# Altium footprint library Footprint-Lib-PhilsLab.PcbLib: 544 footprints (part 7 of 34)
Each footprint in its own frame and in the unit in brackets; x right, y up, seen from the top. Pads: shape width x height; smd on the part's side, far side on the other; paste and mask are expansions set on the pad; w line width, h text height; cw(c..) or ccw(c..) is an arc to the next point about the centre after c.
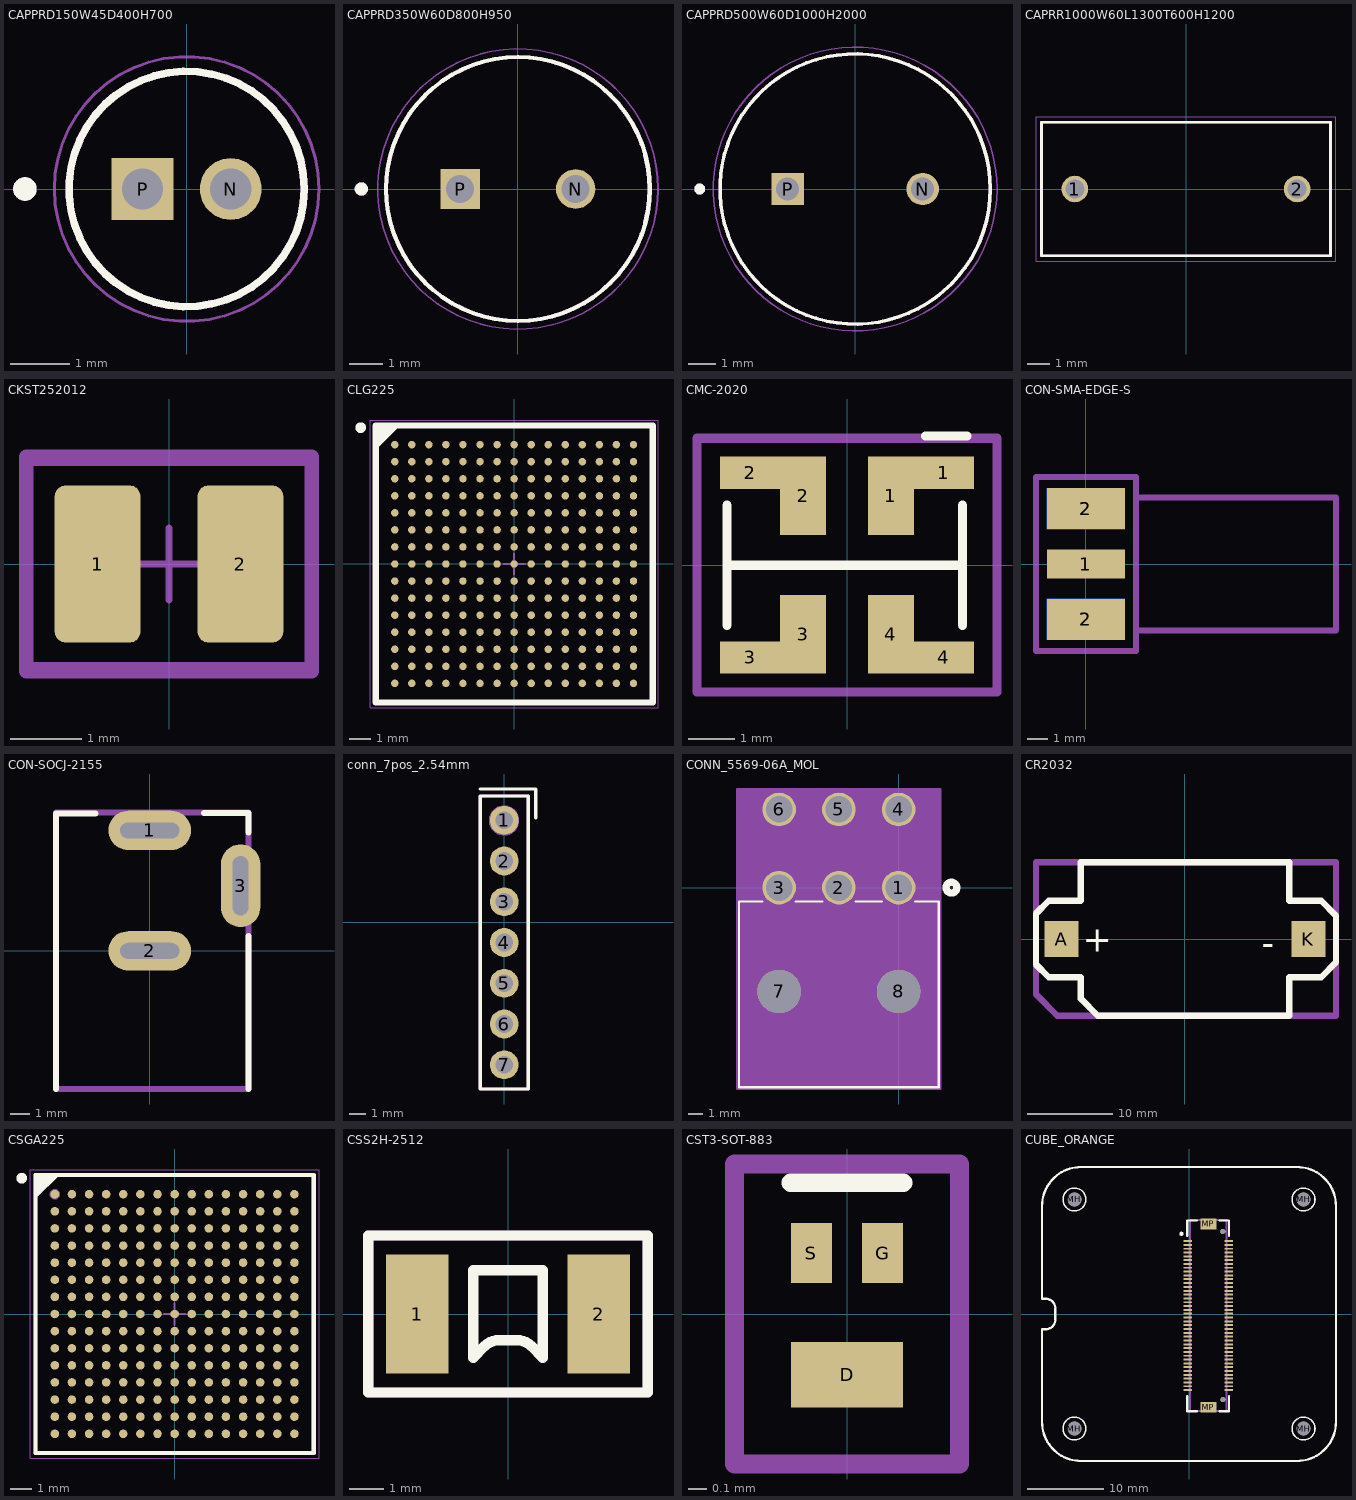
[diagram p6: the footprints below, top view; thin cyan lines are the x and y axes]

## CAPPRD150W45D400H700 [mm]
pads (2):
  round 1.05 hole 0.7: N(0.75,0)
  rect 1.05x1.05 / inner round 1.05 / far side rect 1.05x1.05 hole 0.7: P(-0.75,0)
Top Overlay:
  circle w0.127: c0,0 r2
  circle w0.2: c-2.75,0 r0.1
Mechanical 13:
  circle w0.127: c0,0 r2
  circle w0.2: c-2.75,0 r0.1
Mechanical 15:
  circle w0.05: c0,0 r2.25
3D body "step_temp.STEP": height 7, standoff -17, extent -2,-1.999 2,1.999

## CAPPRD350W60D800H950 [mm]
pads (2):
  round 1.2 hole 0.85: N(1.75,0)
  rect 1.2x1.2 hole 0.85: P(-1.75,0)
Top Overlay:
  circle w0.127: c0,0 r4
  circle w0.2: c-4.75,0 r0.1
Mechanical 13:
  circle w0.127: c0,0 r4
  circle w0.2: c-4.75,0 r0.1
Mechanical 15:
  circle w0.05: c0,0 r4.25
3D body "step_temp.STEP": height 9.5, standoff -17, extent -4,-4 4,4

## CAPPRD500W60D1000H2000 [mm]
pads (2):
  round 1.2 hole 0.85: N(2.5,0)
  rect 1.2x1.2 hole 0.85: P(-2.5,0)
Top Overlay:
  circle w0.127: c0,0 r5
  circle w0.2: c-5.75,0 r0.1
Mechanical 13:
  circle w0.127: c0,0 r5
  circle w0.2: c-5.75,0 r0.1
Mechanical 15:
  circle w0.05: c0,0 r5.25
3D body "step_temp.STEP": height 20, standoff -17, extent -5,-5 5,5

## CAPRR1000W60L1300T600H1200 [mm]
pads (2):
  round 1.2 hole 0.85: 1(-5,0) 2(5,0)
Top Overlay:
  lines w0.127: -6.5,-3 -6.5,3 6.5,3 6.5,-3 -6.5,-3
Mechanical 13:
  lines w0.127: -6.5,-3 6.5,-3 6.5,3 -6.5,3 -6.5,-3
Mechanical 15:
  lines w0.05: -6.75,-3.25 6.75,-3.25 6.75,3.25 -6.75,3.25 -6.75,-3.25
3D body "Film Capacitor 13x6x12mm.step": height 12.01, standoff -2.49, extent -6.5,-3 6.5,3

## CKST252012 [mm]
height 1.2
pads (2):
  rrect25% 1.2x2.2 smd: 1(-1,0) 2(1,0)
Mechanical 13:
  lines w0.2: -2,-1.5 -2,1.5 2,1.5 2,-1.5 -2,-1.5
  text "'.Designator'" at -5.665,-0.417 h1
Mechanical 15:
  lines w0.05: -1.95,-1.4 -1.95,1.4 1.95,1.4 1.95,-1.4 -1.95,-1.4
  lines w0.1: -0.5,0 0.5,0 ; 0,-0.5 0,0.5
3D body "CKST252012.step": height 1.2, standoff 0, extent -1.35,-1.1 1.35,1.1

## CLG225 [mm] "BGA, 225-Leads, Body 13.00x13.00mmx1.50mm, Pitch 0.80mm"
height 1.5
pads (225):
  round 0.35 smd mask+0.03: A1(-5.6,5.6) A2(-4.8,5.6) A3(-4,5.6) A4(-3.2,5.6) A5(-2.4,5.6) A6(-1.6,5.6) A7(-0.8,5.6) A8(0,5.6) A9(0.8,5.6) A10(1.6,5.6) A11(2.4,5.6) A12(3.2,5.6) A13(4,5.6) A14(4.8,5.6) A15(5.6,5.6) B1(-5.6,4.8) B2(-4.8,4.8) B3(-4,4.8) B4(-3.2,4.8) B5(-2.4,4.8) B6(-1.6,4.8) B7(-0.8,4.8) B8(0,4.8) B9(0.8,4.8) B10(1.6,4.8) B11(2.4,4.8) B12(3.2,4.8) B13(4,4.8) B14(4.8,4.8) B15(5.6,4.8) C1(-5.6,4) C2(-4.8,4) C3(-4,4) C4(-3.2,4) C5(-2.4,4) C6(-1.6,4) C7(-0.8,4) C8(0,4) C9(0.8,4) C10(1.6,4) C11(2.4,4) C12(3.2,4) C13(4,4) C14(4.8,4) C15(5.6,4) D1(-5.6,3.2) D2(-4.8,3.2) D3(-4,3.2) D4(-3.2,3.2) D5(-2.4,3.2) D6(-1.6,3.2) D7(-0.8,3.2) D8(0,3.2) D9(0.8,3.2) D10(1.6,3.2) D11(2.4,3.2) D12(3.2,3.2) D13(4,3.2) D14(4.8,3.2) D15(5.6,3.2) E1(-5.6,2.4) E2(-4.8,2.4) E3(-4,2.4) E4(-3.2,2.4) E5(-2.4,2.4) E6(-1.6,2.4) E7(-0.8,2.4) E8(0,2.4) E9(0.8,2.4) E10(1.6,2.4) E11(2.4,2.4) E12(3.2,2.4) E13(4,2.4) E14(4.8,2.4) E15(5.6,2.4) F1(-5.6,1.6) F2(-4.8,1.6) F3(-4,1.6) F4(-3.2,1.6) F5(-2.4,1.6) F6(-1.6,1.6) F7(-0.8,1.6) F8(0,1.6) F9(0.8,1.6) F10(1.6,1.6) F11(2.4,1.6) F12(3.2,1.6) F13(4,1.6) F14(4.8,1.6) F15(5.6,1.6) G1(-5.6,0.8) G2(-4.8,0.8) G3(-4,0.8) G4(-3.2,0.8) G5(-2.4,0.8) G6(-1.6,0.8) G7(-0.8,0.8) G8(0,0.8) G9(0.8,0.8) G10(1.6,0.8) G11(2.4,0.8) G12(3.2,0.8) G13(4,0.8) G14(4.8,0.8) G15(5.6,0.8) H1(-5.6,0) H2(-4.8,0) H3(-4,0) H4(-3.2,0) H5(-2.4,0) H6(-1.6,0) H7(-0.8,0) H8(0,0) H9(0.8,0) H10(1.6,0) H11(2.4,0) H12(3.2,0) H13(4,0) H14(4.8,0) H15(5.6,0) J1(-5.6,-0.8) J2(-4.8,-0.8) J3(-4,-0.8) J4(-3.2,-0.8) J5(-2.4,-0.8) J6(-1.6,-0.8) J7(-0.8,-0.8) J8(0,-0.8) J9(0.8,-0.8) J10(1.6,-0.8) J11(2.4,-0.8) J12(3.2,-0.8) J13(4,-0.8) J14(4.8,-0.8) J15(5.6,-0.8) K1(-5.6,-1.6) K2(-4.8,-1.6) K3(-4,-1.6) K4(-3.2,-1.6) K5(-2.4,-1.6) K6(-1.6,-1.6) K7(-0.8,-1.6) K8(0,-1.6) K9(0.8,-1.6) K10(1.6,-1.6) K11(2.4,-1.6) K12(3.2,-1.6) K13(4,-1.6) K14(4.8,-1.6) K15(5.6,-1.6) L1(-5.6,-2.4) L2(-4.8,-2.4) L3(-4,-2.4) L4(-3.2,-2.4) L5(-2.4,-2.4) L6(-1.6,-2.4) L7(-0.8,-2.4) L8(0,-2.4) L9(0.8,-2.4) L10(1.6,-2.4) L11(2.4,-2.4) L12(3.2,-2.4) L13(4,-2.4) L14(4.8,-2.4) L15(5.6,-2.4) M1(-5.6,-3.2) M2(-4.8,-3.2) M3(-4,-3.2) M4(-3.2,-3.2) M5(-2.4,-3.2) M6(-1.6,-3.2) M7(-0.8,-3.2) M8(0,-3.2) M9(0.8,-3.2) M10(1.6,-3.2) M11(2.4,-3.2) M12(3.2,-3.2) M13(4,-3.2) M14(4.8,-3.2) M15(5.6,-3.2) N1(-5.6,-4) N2(-4.8,-4) N3(-4,-4) N4(-3.2,-4) N5(-2.4,-4) N6(-1.6,-4) N7(-0.8,-4) N8(0,-4) N9(0.8,-4) N10(1.6,-4) N11(2.4,-4) N12(3.2,-4) N13(4,-4) N14(4.8,-4) N15(5.6,-4) P1(-5.6,-4.8) P2(-4.8,-4.8) P3(-4,-4.8) P4(-3.2,-4.8) P5(-2.4,-4.8) P6(-1.6,-4.8) P7(-0.8,-4.8) P8(0,-4.8) P9(0.8,-4.8) P10(1.6,-4.8) P11(2.4,-4.8) P12(3.2,-4.8) P13(4,-4.8) P14(4.8,-4.8) P15(5.6,-4.8) R1(-5.6,-5.6) R2(-4.8,-5.6) R3(-4,-5.6) R4(-3.2,-5.6) R5(-2.4,-5.6) R6(-1.6,-5.6) R7(-0.8,-5.6) R8(0,-5.6) R9(0.8,-5.6) R10(1.6,-5.6) R11(2.4,-5.6) R12(3.2,-5.6) R13(4,-5.6) R14(4.8,-5.6) R15(5.6,-5.6)
Top Overlay:
  circle w0.25: c-7.2,6.4 r0.125
  region: -5.549,6.5 -6.5,5.549 -6.5,6.5
  lines w0.3: -6.5,5.549 -5.549,6.5 ; -6.5,-6.5 -6.5,6.5 6.5,6.5 6.5,-6.5 -6.5,-6.5
Mechanical 13:
  lines w0.1: -6.5,-6.5 -6.5,6.5 6.5,6.5 6.5,-6.5 -6.5,-6.5
Mechanical 15:
  lines w0.05: -6.75,-6.75 -6.75,6.75 6.75,6.75 6.75,-6.75 -6.75,-6.75
  lines w0.1: -0.5,0 0.5,0 ; 0,-0.5 0,0.5
3D body "CLG225.step": height 1.5, standoff 0, extent -6.5,-6.5 6.5,6.5

## CMC-2020 [mm]
height 2.5
pads (8):
  rect 1x1.7 smd: 1(0.95,1.5) 2(-0.95,1.5) 3(-0.95,-1.5) 4(0.95,-1.5)
  rect 1.3x0.7 smd: 1(2.1,2) 2(-2.1,2) 3(-2.1,-2) 4(2.1,-2)
Top Overlay:
  lines w0.2: -2.6,-1.3 -2.6,1.3 ; -2.6,0 2.5,0 ; 1.7,2.8 2.6,2.8 ; 2.5,-1.3 2.5,1.3
Mechanical 13:
  circle w0.35: c2.25,2 r0.15
  lines w0.2: -3.25,-2.75 3.25,-2.75 3.25,2.75 -3.25,2.75 -3.25,-2.75
  text "'.Designator'" at -5.665,-0.417 h1
3D body "DLW5BTM251SQ2L.STEP": height 2.51, standoff 0.01, extent -2.5,-2.5 2.5,2.5

## CON-SMA-EDGE-S [mm]
pads (5):
  rect 3.8x1.4 smd mask+0.07: 1(0,0)
  rect 3.8x2 smd mask+0.07: 2(0,-2.7) 2(0,2.7)
  rect 3.8x2 smd far side mask+0.07: 2(0,-2.7) 2(0,2.7)
Mechanical 13:
  lines w0.3: 2.45,-3.25 12.2,-3.25 12.2,3.25 2.45,3.25 ; -2.433,-4.25 2.45,-4.25 2.45,-4 2.45,4.25 -2.433,4.25 -2.433,-4.25
  text "'.Designator'" at -5.84,-0.925 h1
3D body "CON-SMA-EDGE-S.step": height 3.64, standoff -2.71, extent -1.16,-3.175 12.17,3.175

## CON-SOCJ-2155 [mm]
pads (3):
  oval 4.2x2 hole 0.8 slot 3 at 0 deg: 1(0,6.1) 2(0,0)
  oval 2x4.2 hole 0.8 slot 3 at 90 deg: 3(4.6,3.3)
Top Overlay:
  lines w0.3: -4.75,-7 -4.75,6.95 -2.75,6.95 ; 2.75,6.976 5,6.976 5,6 ; 5,-7 5,0.75
Mechanical 13:
  lines w0.3: -4.75,-7 5,-7 5,7 -4.75,7 -4.75,-7
  text "'.Designator'" at -5.665,-0.417 h1
3D body "CON-SOCJ-2155.STEP": height 11.11, standoff -4.29, extent -4.5,-7.5 4.75,6.6

## conn_7pos_2.54mm [mm]
pads (7):
  round 1.8 hole 1.1 mask+0.07: 1(0,6.35) 2(0,3.81) 3(0,1.27) 4(0,-1.27) 5(0,-3.81) 6(0,-6.35) 7(0,-8.89)
Top Overlay:
  lines w0.2: -1.5,8.3 1.972,8.3 1.972,6.5 ; -1.5,-10.4 -1.5,7.863 1.5,7.863 1.5,-10.4 -1.5,-10.4
Mechanical 13:
  circle w0.25: c-0.012,6.336 r0.823
  lines w0.2: -1.5,-10.4 -1.5,7.864 1.5,7.864 1.5,-10.4 -1.5,-10.4
  text "'.Designator'" at -5.84,-0.925 h1

## CONN_5569-06A_MOL [mil]
pads (8):
  round 93 hole 73 paste-99999 mask+0: 1(0,0) 2(-165.35,0) 3(-330.71,0) 4(0,216.54) 5(-165.35,216.54) 6(-330.71,216.54)
  round 120 hole 120 unplated paste-99999 mask+0: 7(-330.71,-287.4) 8(0,-287.4)
Top Overlay:
  circle w20: c146.15,0 r15
  lines w6: -376.37,-38.31 -441.85,-38.31 -441.85,-552.31 111.15,-552.31 111.15,-38.31 45.66,-38.31 ; -285.05,-38.31 -211.01,-38.31 ; -119.7,-38.31 -45.66,-38.31
  text ".Designator" at -302.85,83.27 h50
Bottom Overlay:
  circle w20: c146.15,0 r15
Mechanical 13:
  circle w20: c0,0 r15
  lines w1: -436.85,-547.31 -436.85,-43.31 106.15,-43.31 106.15,-547.31 -436.85,-547.31
  text ".Designator" at -302.85,83.27 h50
Mechanical 15:
  region: 116.15,273.04 -446.85,273.04 -446.85,-557.31 116.15,-557.31
  lines w6: -446.85,-557.31 116.15,-557.31 116.15,273.04 -446.85,273.04 -446.85,-557.31
3D body "39-30-1060--3DModel-STEP-269445.STEP": height 448.82, standoff -141.73, extent -442.91,-543.7 116.03,241.14

## CR2032 [mm]
pads (2):
  rect 4x4.2 smd: A(-14.5,0) K(14.5,0)
Top Overlay:
  lines w0.75: -17.5,-3 -17.5,3 -16,4.5 -12.25,4.5 -12.25,9 12.25,9 12.25,4.5 16,4.5 17.75,2.75 17.75,-2.75 16,-4.5 12.25,-4.5 12.25,-9 -10.25,-9 -12.25,-7 -12.25,-4.5 -16,-4.5 -17.5,-3
  text "-" at 9,-1.9 h3
  text "+" at -12,-1.5 h3
Mechanical 13:
  lines w0.75: -17.5,-0.75 -17.5,9 17.75,9 17.75,-9 -15,-9 -17.5,-6.5 -17.5,3.25
  text "'.Designator'" at -11.88,-1.8 h2
  text "+" at -15.8,-1.4 h3
  text "-" at 13.2,-1.9 h3
3D body "CR2032_Holder.STEP": height 5.61, standoff 0.01, extent -16.1,-8 16.1,8

## CSGA225 [mm] "BGA, 225-Leads, Body 13.00x13.00mmx1.40mm, Pitch 0.80mm"
height 1.4
pads (225):
  round 0.4 smd: A1(-5.6,5.6) A2(-4.8,5.6) A3(-4,5.6) A4(-3.2,5.6) A5(-2.4,5.6) A6(-1.6,5.6) A7(-0.8,5.6) A8(0,5.6) A9(0.8,5.6) A10(1.6,5.6) A11(2.4,5.6) A12(3.2,5.6) A13(4,5.6) A14(4.8,5.6) A15(5.6,5.6) B1(-5.6,4.8) B2(-4.8,4.8) B3(-4,4.8) B4(-3.2,4.8) B5(-2.4,4.8) B6(-1.6,4.8) B7(-0.8,4.8) B8(0,4.8) B9(0.8,4.8) B10(1.6,4.8) B11(2.4,4.8) B12(3.2,4.8) B13(4,4.8) B14(4.8,4.8) B15(5.6,4.8) C1(-5.6,4) C2(-4.8,4) C3(-4,4) C4(-3.2,4) C5(-2.4,4) C6(-1.6,4) C7(-0.8,4) C8(0,4) C9(0.8,4) C10(1.6,4) C11(2.4,4) C12(3.2,4) C13(4,4) C14(4.8,4) C15(5.6,4) D1(-5.6,3.2) D2(-4.8,3.2) D3(-4,3.2) D4(-3.2,3.2) D5(-2.4,3.2) D6(-1.6,3.2) D7(-0.8,3.2) D8(0,3.2) D9(0.8,3.2) D10(1.6,3.2) D11(2.4,3.2) D12(3.2,3.2) D13(4,3.2) D14(4.8,3.2) D15(5.6,3.2) E1(-5.6,2.4) E2(-4.8,2.4) E3(-4,2.4) E4(-3.2,2.4) E5(-2.4,2.4) E6(-1.6,2.4) E7(-0.8,2.4) E8(0,2.4) E9(0.8,2.4) E10(1.6,2.4) E11(2.4,2.4) E12(3.2,2.4) E13(4,2.4) E14(4.8,2.4) E15(5.6,2.4) F1(-5.6,1.6) F2(-4.8,1.6) F3(-4,1.6) F4(-3.2,1.6) F5(-2.4,1.6) F6(-1.6,1.6) F7(-0.8,1.6) F8(0,1.6) F9(0.8,1.6) F10(1.6,1.6) F11(2.4,1.6) F12(3.2,1.6) F13(4,1.6) F14(4.8,1.6) F15(5.6,1.6) G1(-5.6,0.8) G2(-4.8,0.8) G3(-4,0.8) G4(-3.2,0.8) G5(-2.4,0.8) G6(-1.6,0.8) G7(-0.8,0.8) G8(0,0.8) G9(0.8,0.8) G10(1.6,0.8) G11(2.4,0.8) G12(3.2,0.8) G13(4,0.8) G14(4.8,0.8) G15(5.6,0.8) H1(-5.6,0) H2(-4.8,0) H3(-4,0) H4(-3.2,0) H5(-2.4,0) H6(-1.6,0) H7(-0.8,0) H8(0,0) H9(0.8,0) H10(1.6,0) H11(2.4,0) H12(3.2,0) H13(4,0) H14(4.8,0) H15(5.6,0) J1(-5.6,-0.8) J2(-4.8,-0.8) J3(-4,-0.8) J4(-3.2,-0.8) J5(-2.4,-0.8) J6(-1.6,-0.8) J7(-0.8,-0.8) J8(0,-0.8) J9(0.8,-0.8) J10(1.6,-0.8) J11(2.4,-0.8) J12(3.2,-0.8) J13(4,-0.8) J14(4.8,-0.8) J15(5.6,-0.8) K1(-5.6,-1.6) K2(-4.8,-1.6) K3(-4,-1.6) K4(-3.2,-1.6) K5(-2.4,-1.6) K6(-1.6,-1.6) K7(-0.8,-1.6) K8(0,-1.6) K9(0.8,-1.6) K10(1.6,-1.6) K11(2.4,-1.6) K12(3.2,-1.6) K13(4,-1.6) K14(4.8,-1.6) K15(5.6,-1.6) L1(-5.6,-2.4) L2(-4.8,-2.4) L3(-4,-2.4) L4(-3.2,-2.4) L5(-2.4,-2.4) L6(-1.6,-2.4) L7(-0.8,-2.4) L8(0,-2.4) L9(0.8,-2.4) L10(1.6,-2.4) L11(2.4,-2.4) L12(3.2,-2.4) L13(4,-2.4) L14(4.8,-2.4) L15(5.6,-2.4) M1(-5.6,-3.2) M2(-4.8,-3.2) M3(-4,-3.2) M4(-3.2,-3.2) M5(-2.4,-3.2) M6(-1.6,-3.2) M7(-0.8,-3.2) M8(0,-3.2) M9(0.8,-3.2) M10(1.6,-3.2) M11(2.4,-3.2) M12(3.2,-3.2) M13(4,-3.2) M14(4.8,-3.2) M15(5.6,-3.2) N1(-5.6,-4) N2(-4.8,-4) N3(-4,-4) N4(-3.2,-4) N5(-2.4,-4) N6(-1.6,-4) N7(-0.8,-4) N8(0,-4) N9(0.8,-4) N10(1.6,-4) N11(2.4,-4) N12(3.2,-4) N13(4,-4) N14(4.8,-4) N15(5.6,-4) P1(-5.6,-4.8) P2(-4.8,-4.8) P3(-4,-4.8) P4(-3.2,-4.8) P5(-2.4,-4.8) P6(-1.6,-4.8) P7(-0.8,-4.8) P8(0,-4.8) P9(0.8,-4.8) P10(1.6,-4.8) P11(2.4,-4.8) P12(3.2,-4.8) P13(4,-4.8) P14(4.8,-4.8) P15(5.6,-4.8) R1(-5.6,-5.6) R2(-4.8,-5.6) R3(-4,-5.6) R4(-3.2,-5.6) R5(-2.4,-5.6) R6(-1.6,-5.6) R7(-0.8,-5.6) R8(0,-5.6) R9(0.8,-5.6) R10(1.6,-5.6) R11(2.4,-5.6) R12(3.2,-5.6) R13(4,-5.6) R14(4.8,-5.6) R15(5.6,-5.6)
Top Overlay:
  circle w0.25: c-7.15,6.35 r0.125
  region: -5.513,6.5 -6.5,5.513 -6.5,6.5
  lines w0.2: -6.5,5.513 -5.513,6.5 ; -6.5,-6.5 -6.5,6.5 6.5,6.5 6.5,-6.5 -6.5,-6.5
Mechanical 13:
  circle w0.254: c-5.603,5.597 r0.117
  lines w0.2: -6.5,-6.5 -6.5,6.5 6.5,6.5 6.5,-6.5 -6.5,-6.5
  text ".Designator" at -4.998,-0.333 h1
Mechanical 15:
  lines w0.05: -6.75,-6.75 -6.75,6.75 6.75,6.75 6.75,-6.75 -6.75,-6.75
  lines w0.1: -0.5,0 0.5,0 ; 0,-0.5 0,0.5
3D body "CSGA225.step": height 1.4, standoff 0, extent -6.5,-6.5 6.5,6.5

## CSS2H-2512 [mm]
pads (2):
  rect 1.8x3.4 smd: 1(-2.6,0) 2(2.6,0)
Top Overlay:
  lines w0.3: -4,-2.25 -4,2.25 4,2.25 4,-2.25 -4,-2.25 ; -1,-1.25 -1,1.25 1,1.25 1,-1.25 0.677,-0.927 ccw(c0.25,-1.354) 0.25,-0.75 -0.25,-0.75 ccw(c-0.25,-1.354) -0.677,-0.927 -1,-1.25
Mechanical 13:
  lines w0.3: -4,-2.25 -4,2.25 4,2.25 4,-2.25 -3.75,-2.25 -4,-2.25
  text "'.Designator'" at -7.231,-1.087 h1.25
3D body "CSS2H-2512.step": height 0.84, standoff 0.01, extent -3.175,-1.525 3.175,1.525

## CST3-SOT-883 [mm]
pads (3):
  rect 0.6x0.35 smd: D(0,-0.325)
  rect 0.22x0.32 smd: G(0.19,0.325) S(-0.19,0.325)
Top Overlay:
  lines w0.1: -0.3,0.7 0.3,0.7
Mechanical 13:
  lines w0.1: -0.6,-0.8 -0.6,0.8 0.6,0.8 0.6,-0.8 -0.6,-0.8
  text "'.Designator'" at -5.665,-0.417 h1
3D body "CST3.STEP": height 0.39, standoff 0.01, extent -0.3,-0.5 0.3,0.5

## CUBE_ORANGE [mil]
pads (88):
  rect 44x10 smd mask+7.87: 1(-5.5,375.5) 2(203.83,375.5) 3(-5.5,356.5) 4(203.83,356.5) 5(-5.5,336.5) 6(203.83,336.5) 7(-5.5,316.5) 8(203.83,316.5) 9(-5.5,297.5) 10(203.83,297.5) 11(-5.5,277.5) 12(203.83,277.5) 13(-5.5,257.5) 14(203.83,257.5) 15(-5.5,238.5) 16(203.83,238.5) 17(-5.5,218.5) 18(203.83,218.5) 19(-5.5,198.5) 20(203.83,198.5) 21(-5.5,179.5) 22(203.83,179.5) 23(-5.5,159.5) 24(203.83,159.5) 25(-5.5,139.5) 26(203.83,139.5) 27(-5.5,119.5) 28(203.83,119.5) 29(-5.5,100.5) 30(203.83,100.5) 31(-5.5,80.5) 32(203.83,80.5) 33(-5.5,60.5) 34(203.83,60.5) 35(-5.5,41.5) 36(203.83,41.5) 37(-5.5,21.5) 38(203.83,21.5) 39(-5.5,1.5) 40(203.83,1.5) 41(-5.5,-18.34) 42(203.83,-18.34) 43(-5.5,-38.03) 44(203.83,-38.03) 45(-5.5,-57.71) 46(203.83,-57.71) 47(-5.5,-77.4) 48(203.83,-77.4) 49(-5.5,-97.08) 50(203.83,-97.08) 51(-5.5,-116.77) 52(203.83,-116.77) 53(-5.5,-136.45) 54(203.83,-136.45) 55(-5.5,-156.14) 56(203.83,-156.14) 57(-5.5,-175.82) 58(203.83,-175.82) 59(-5.5,-195.51) 60(203.83,-195.51) 61(-5.5,-215.19) 62(203.83,-215.19) 63(-5.5,-234.88) 64(203.83,-234.88) 65(-5.5,-254.56) 66(203.83,-254.56) 67(-5.5,-274.25) 68(203.83,-274.25) 69(-5.5,-293.93) 70(203.83,-293.93) 71(-5.5,-313.62) 72(203.83,-313.62) 73(-5.5,-333.3) 74(203.83,-333.3) 75(-5.5,-352.99) 76(203.83,-352.99) 77(-5.5,-372.67) 78(203.83,-372.67) 79(-5.5,-392.36) 80(203.83,-392.36)
  round 70.87 hole 70.87 unplated mask+19.68: MH(-590.55,-590.55) MH(-590.55,590.55) MH(590.55,-590.55) MH(590.55,590.55)
  round 26 hole 26 unplated: MH(174.3,-441.57) MH(174.3,425.5)
  rect 83x56 smd: MP(99.5,-480.94) MP(99.5,464.5)
Top Overlay:
  circle w7.87: c590.5,-590.5 r59.06
  circle w7.87: c590.5,590.5 r59.06
  circle w7.87: c-590.55,-590.55 r59.06
  circle w7.87: c-590.55,590.55 r59.06
  circle w11.81: c-39.37,413.39 r4.92
  lines w11.81: -9.84,-423.23 -9.84,-501.97 39.37,-501.97 ; -9.84,403.54 -9.84,482.28 39.37,482.28 ; 157.48,-501.97 206.69,-501.97 206.69,-423.23 ; 157.48,482.28 206.69,482.28 206.69,403.54 ; -757.87,78.74 ccw(c-757.87,78.75) -757.86,78.75 ; -757.87,78.74 -738.98,78.74 cw(c-738.98,28.74) -688.98,28.74 -688.98,0 -688.98,-28.74 cw(c-738.98,-28.74) -738.98,-78.74 -757.87,-78.74 -757.87,-557.42 ccw(c-557.42,-557.42) -557.42,-757.87 557.4,-757.87 ccw(c557.4,-557.42) 757.86,-557.42 757.87,557.42 ccw(c557.4,557.42) 557.4,757.87 -557.4,757.87 ccw(c-557.4,557.42) -757.86,557.42 -757.86,78.75
Bottom Overlay:
  circle w7.87: c590.5,-590.5 r59.06
  circle w7.87: c590.5,-590.5 r59.06
  circle w7.87: c590.5,590.5 r59.06
  circle w7.87: c590.5,590.5 r59.06
  circle w7.87: c-590.55,-590.55 r59.06
  circle w7.87: c-590.55,-590.55 r59.06
  circle w7.87: c-590.55,590.55 r59.06
  circle w7.87: c-590.55,590.55 r59.06
Top Component Center:
  lines w10: 4.5,-500.63 4.5,484.5 193.99,484.5 193.99,-500.63 4.5,-500.63
Multi-Layer:
  drawing of 4 lines, arcs and shapes, not listed
3D body "Cube.STEP": height 870.58, standoff 0.5, extent -751.96,-751.97 751.98,751.97
3D body "DF17(1_0H)-80DP-0_5V.stp": height 123.54, standoff -30.01, extent -15.41,-500.59 209,483.66